# Altium integrated library Altium_Power_Supply_IC.IntLib: 96 symbols (part 2 of 2)
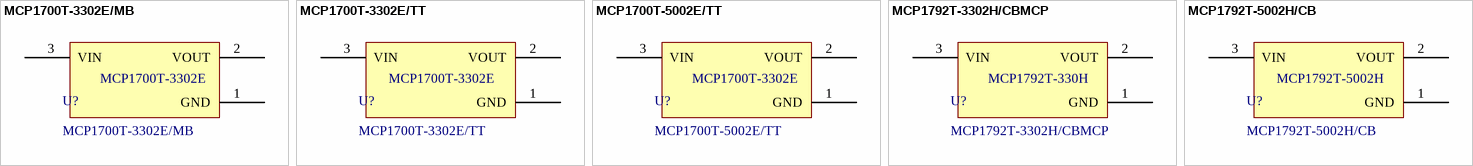
[diagram p12: symbols MCP1700T-3302E/MB to MCP1792T-5002H/CB]

## MCP1700T-3302E/TT
designator U?
Linear Voltage Regulator IC Positive Fixed 1 Output 250mA SOT-23-3; Manufacturer: Microchip Technology; Voltage Input: 6V; Voltage Output: 3.3VV; Supply 1 Name: Mouser; Supply 1 SN: 579-MCP1700T3302E/TT; Supply 2 Name: DigiKey; Supply 2 SN: MCP1700T3302ETTTR-ND; Supply 3 Name: ThegioiIC; Manufacturer Part Number: MCP1700T-3302E/TT; Mounting Technology: SMD; Current Input: *; Current Output: 250mA; Datasheet: https://www.mouser.com/datasheet/2/268/MCP1700_Data_Sheet_20001826F-737536.pdf; Supply 1 URL: https://www.mouser.com/ProductDetail/Microchip-Technology/MCP1700T-3302E-TT?qs=fM4xO01eazPmCNDrdHEdaw%3D%3D; Supply 2 URL: https://www.digikey.com/en/products/detail/microchip-technology/MCP1700T-3302E-TT/652676; Supply 3 SN: *; Supply 3 URL: https://www.thegioiic.com/mcp1700t-3302e-ic-on-ap-3-3v-250ma
footprint MCP1700T-3302E/TT (SOT23, 3-Leads, Body 2.86x2.37mm, Pitch 0.95mm)
pins: 1 GND (power), 2 VOUT (power), 3 VIN (power)
text: MCP1700T-3302E

## MCP1700T-5002E/TT
designator U?
IC REG LINEAR 5V 250MA SOT23-3; Manufacturer: Microchip Technology; Voltage Input: 6; Supply 1 Name: Mouser; Supply 1 SN: 579-MCP1700T5002E/TT; Supply 2 Name: DigiKey; Supply 2 SN: MCP1700T5002ETTTR-ND; Supply 3 Name: ThegioiIC; Manufacturer Part Number: MCP1700T-5002E/TT; Mounting Technology: SMD; Current Input: *; Voltage Output: 5V; Current Output: 250mA; Datasheet: https://www.mouser.com/datasheet/2/268/MCP1700_Data_Sheet_20001826F-737536.pdf; Supply 1 URL: https://www.mouser.com/ProductDetail/Microchip-Technology/MCP1700T-5002E-TT?qs=fM4xO01eazNr4AnStMRB%2Fg%3D%3D; Supply 2 URL: https://www.digikey.com/en/products/detail/microchip-technology/MCP1700T-5002E-TT/652681; Supply 3 SN: *; Supply 3 URL: https://www.thegioiic.com/mcp1700t-5002e-mb-ic-on-ap-5v-250ma
footprint MCP1700T-5002E/TT (SOT23, 3-Leads, Body 2.86x2.37mm, Pitch 0.95mm)
pins: 1 GND (power), 2 VOUT (power), 3 VIN (power)
text: MCP1700T-3302E

## MCP1792T-3302H/CBMCP
designator U?
LDO Voltage Regulators High input voltage regulator 3.3V 3Ld SOT-23A TR.; Manufacturer: Microchip Technology; Voltage Input: 4.5V - 55V; Current Output: 100mA; Supply 1 Name: Mouser; Supply 1 SN: 579-MCP1792T-3302HCB; Supply 2 Name: DigiKey; Supply 2 SN: MCP1792T-3302H/CBTR-ND; Manufacturer Part Number: MCP1792T-3302H/CB; Mounting Technology: SMD; Current Input: *; Voltage Output: 3.3V; Datasheet: https://www.mouser.com/datasheet/2/268/MCP1792_Family_Data_Sheet_DS20006229D-2891803.pdf; Supply 1 URL: https://www.mouser.com/ProductDetail/Microchip-Technology/MCP1792T-3302H-CB?qs=mAH9sUMRCtsJR7ybQ6HmQA%3D%3D; Supply 2 URL: https://www.digikey.com/en/products/detail/microchip-technology/MCP1792T-3302H-CB/10297921; Supply 3 Name: *; Supply 3 SN: *; Supply 3 URL: *
footprint MCP1792T-3302H/CB (SOT23, 3-Leads, Body 2.90x2.55mm, Pitch 0.95mm)
pins: 1 GND (power), 2 VOUT (power), 3 VIN (power)
text: MCP1792T-330H

## MCP1792T-5002H/CB
designator U?
LDO Voltage Regulators High input voltage regulator 5.0 V 3Ld SOT-23A TR; Manufacturer: Microchip Technology; Voltage Input: 4.5V - 55V; Voltage Output: 5V; Current Output: 100mA; Supply 1 Name: Mouser; Supply 1 SN: 579-MCP1792T-5002HCB; Supply 2 Name: DigiKey; Supply 2 SN: MCP1792T-5002H/CBTR-ND; Manufacturer Part Number: MCP1792T-5002H/CB; Mounting Technology: SMD; Current Input: *; Datasheet: https://www.mouser.com/datasheet/2/268/MCP1792_Family_Data_Sheet_DS20006229D-2891803.pdf; Supply 1 URL: https://www.mouser.com/ProductDetail/Microchip-Technology/MCP1792T-5002H-CB?qs=mAH9sUMRCtuAXaaRege0yg%3D%3D; Supply 2 URL: https://www.digikey.com/en/products/detail/microchip-technology/MCP1792T-5002H-CB/10297923; Supply 3 Name: *; Supply 3 SN: *; Supply 3 URL: *
footprint MCP1792T-5002HCB (SOT23, 3-Leads, Body 2.90x2.55mm, Pitch 0.95mm)
pins: 1 GND (power), 2 VOUT (power), 3 VIN (power)
text: MCP1792T-5002H


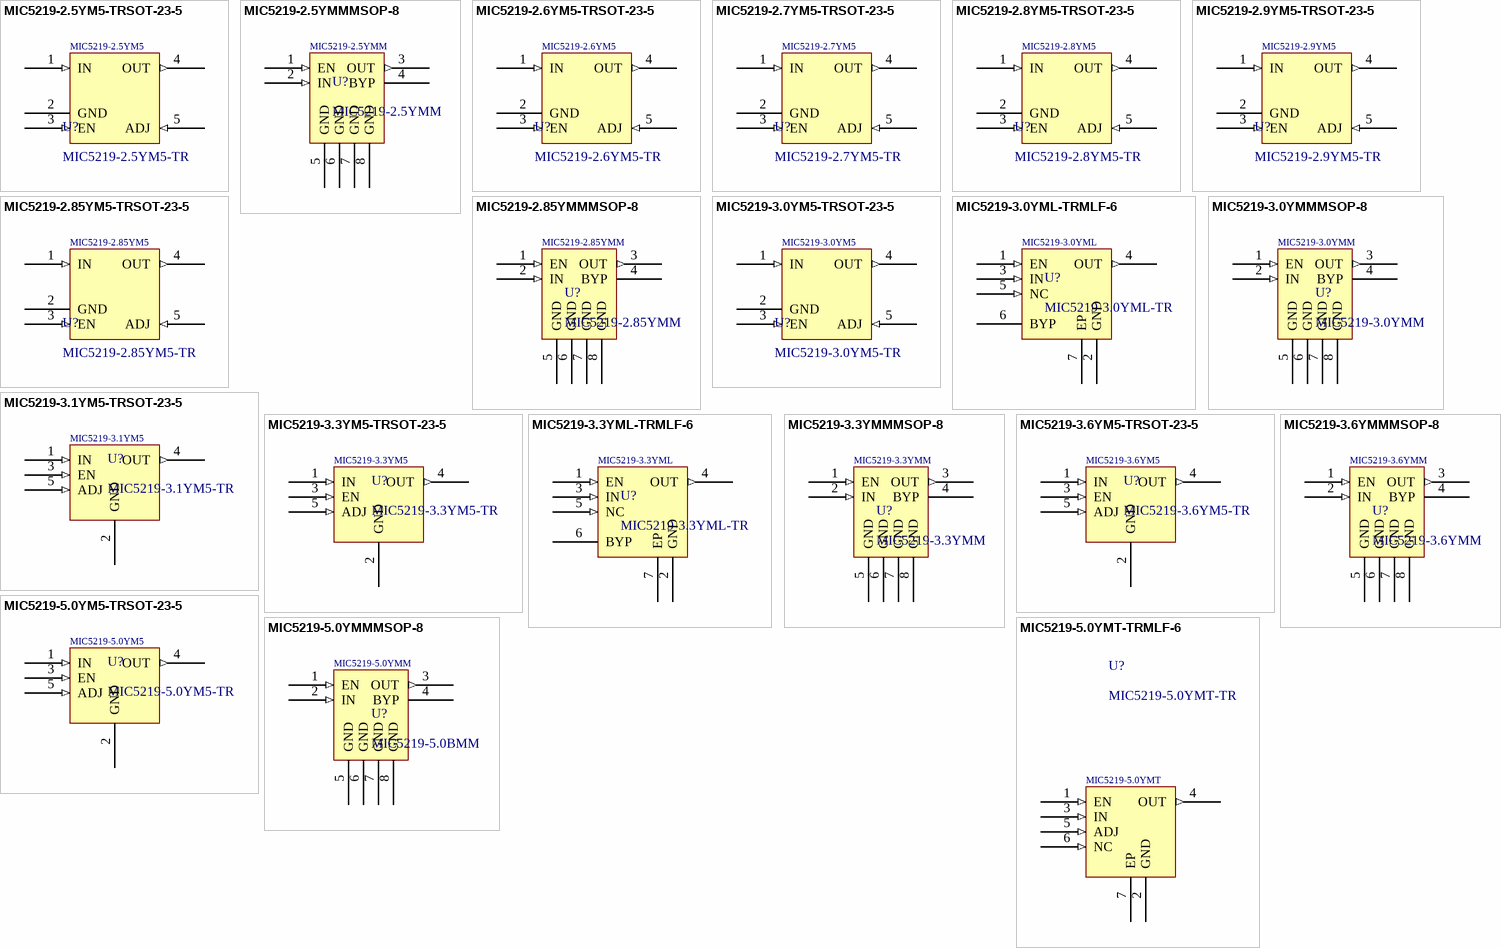
[diagram p7: symbols MIC5219-2.5YM5-TRSOT-23-5 to MIC5219-5.0YMT-TRMLF-6]

## MIC5219-2.5YM5-TRSOT-23-5
designator U?, comment MIC5219-2.5YM5-TR
MIC5219-x family LDO Voltage Regulators, 2.5V output; Manufacturer: Microchip; Number of Outputs: 1; Input Voltage: 2.5 -12 V; Output Current: 500 mA; PSRR: 75 dB; Dropout Voltage: 350-600 mV; Supply 1 Name: Mouser; Supply 1 SN: 998-MIC5219-2.5YM5TR; Supply 2 Name: Digikey; Supply 2 SN: 576-2758-2-ND; Manufacturer SN: MIC5219-2.5YM5-TR; Mounting Style: SMD/SMT; Package / Case: SOT-23-5; Output Voltage: 2.5 V; ComponentLink1Description: Datasheet; ComponentLink1URL: https://ww1.microchip.com/downloads/en/DeviceDoc/MIC5219-500mA-Peak-Output-LDO-Regulator-DS20006021A.pdf; ComponentLink2Description: Supply 1 URL; ComponentLink2URL: https://www.mouser.vn/ProductDetail/Microchip-Technology/MIC5219-2.5YM5-TR?qs=U6T8BxXiZAXURjP%2FxpAn8w%3D%3D; ComponentLink3Description: Supply 2 URL; ComponentLink3URL: https://www.digikey.com/en/products/detail/microchip-technology/MIC5219-2-5YM5-TR/1030543?s=N4IgTCBcDaILIEkDCBWMBGAnAWjAOhQE04VsAVAJRAF0BfIA
footprint MIC5219-x.xYM5 (MIC5219-x.xYM5, SOT-23-5)
pins: 1 IN (in), 2 GND (power), 3 EN (in), 4 OUT (out), 5 ADJ (in)
text: MIC5219-2.5YM5

## MIC5219-2.5YMMMSOP-8
designator U?, comment MIC5219-2.5YMM
MIC5219-x family LDO Voltage Regulators, 2.5V output; Manufacturer: Microchip; Number of Outputs: 1; Input Voltage: 2.5 -12 V; Output Current: 500 mA; PSRR: 75 dB; Dropout Voltage: 350-600 mV; Supply 1 Name: Mouser; Supply 1 SN: 998-MIC5219-2.5YMM; Supply 2 Name: Digikey; Supply 2 SN: 576-2376-ND; Manufacturer SN: MIC5219-2.5YMM; Mounting Style: SMD/SMT; Package / Case: MSOP-8; Output Voltage: 2.5 V; ComponentLink1Description: Datasheet; ComponentLink1URL: https://ww1.microchip.com/downloads/en/DeviceDoc/MIC5219-500mA-Peak-Output-LDO-Regulator-DS20006021A.pdf; ComponentLink2Description: Supply 1 URL; ComponentLink2URL: https://www.mouser.vn/ProductDetail/Microchip-Technology/MIC5219-2.5YMM?qs=kh6iOki%2FeLGSwVLHtzUtsQ%3D%3D; ComponentLink3Description: Supply 2 URL; ComponentLink3URL: https://www.digikey.com/en/products/detail/microchip-technology/MIC5219-2-5YMM/1030544
footprint MIC5219-x.xYMM (MIC5219-x.xYMM, SOT-23-5)
pins: 1 EN (in), 2 IN (in), 3 OUT (out), 4 BYP, 5 GND (power), 6 GND (power), 7 GND (power), 8 GND (power)

## MIC5219-2.6YM5-TRSOT-23-5
designator U?, comment MIC5219-2.6YM5-TR
MIC5219-x family LDO Voltage Regulators, 2.6V output; Manufacturer: Microchip; Number of Outputs: 1; Input Voltage: 2.5 -12 V; Output Current: 500 mA; PSRR: 75 dB; Dropout Voltage: 350-600 mV; Supply 1 Name: Mouser; Supply 1 SN: 998-MIC5219-2.6YM5TR; Supply 2 Name: Digikey; Supply 2 SN: 576-2759-2-ND; Manufacturer SN: MIC5219-2.6YM5-TR; Mounting Style: SMD/SMT; Package / Case: SOT-23-5; Output Voltage: 2.6 V; ComponentLink1Description: Datasheet; ComponentLink1URL: https://ww1.microchip.com/downloads/en/DeviceDoc/MIC5219-500mA-Peak-Output-LDO-Regulator-DS20006021A.pdf; ComponentLink2Description: Supply 1 URL; ComponentLink2URL: https://www.mouser.vn/ProductDetail/Microchip-Technology/MIC5219-2.6YM5-TR?qs=U6T8BxXiZAU94MGLjAqlLA%3D%3D; ComponentLink3Description: Supply 2 URL; ComponentLink3URL: https://www.digikey.com/en/products/detail/microchip-technology/MIC5219-2-6YM5-TR/1030548?s=N4IgTCBcDaILIEkDCBWMBGAnAWjAOgDYBNOFbAFQCUQBdAXyA
footprint MIC5219-x.xYM5 (MIC5219-x.xYM5, SOT-23-5)
pins: 1 IN (in), 2 GND (power), 3 EN (in), 4 OUT (out), 5 ADJ (in)
text: MIC5219-2.6YM5

## MIC5219-2.7YM5-TRSOT-23-5
designator U?, comment MIC5219-2.7YM5-TR
MIC5219-x family LDO Voltage Regulators, 2.7V output; Manufacturer: Microchip; Number of Outputs: 1; Input Voltage: 2.5 -12 V; Output Current: 500 mA; PSRR: 75 dB; Dropout Voltage: 350-600 mV; Supply 1 Name: Mouser; Supply 1 SN: 998-MIC5219-2.7YM5TR; Supply 2 Name: Digikey; Supply 2 SN: 576-2760-2-ND; Manufacturer SN: MIC5219-2.7YM5-TR; Mounting Style: SMD/SMT; Package / Case: SOT-23-5; Output Voltage: 2.7 V; ComponentLink1Description: Datasheet; ComponentLink1URL: https://ww1.microchip.com/downloads/en/DeviceDoc/MIC5219-500mA-Peak-Output-LDO-Regulator-DS20006021A.pdf; ComponentLink2Description: Supply 1 URL; ComponentLink2URL: https://www.mouser.vn/ProductDetail/Microchip-Technology/MIC5219-2.7YM5-TR?qs=U6T8BxXiZAX%2Fh5H9qQkMlQ%3D%3D; ComponentLink3Description: Supply 2 URL; ComponentLink3URL: https://www.digikey.com/en/products/detail/microchip-technology/MIC5219-2-7YM5-TR/1030550?s=N4IgTCBcDaILIEkDCBWMBGAnAWjAOgHYBNOFbAFQCUQBdAXyA
footprint MIC5219-x.xYM5 (MIC5219-x.xYM5, SOT-23-5)
pins: 1 IN (in), 2 GND (power), 3 EN (in), 4 OUT (out), 5 ADJ (in)
text: MIC5219-2.7YM5

## MIC5219-2.8YM5-TRSOT-23-5
designator U?, comment MIC5219-2.8YM5-TR
MIC5219-x family LDO Voltage Regulators, 2.8V output; Manufacturer: Microchip; Number of Outputs: 1; Input Voltage: 2.5 -12 V; Output Current: 500 mA; PSRR: 75 dB; Dropout Voltage: 350-600 mV; Supply 1 Name: Mouser; Supply 1 SN: 998-MIC5219-2.8YM5TR; Supply 2 Name: Digikey; Supply 2 SN: 576-2762-2-ND; Manufacturer SN: MIC5219-2.8YM5-TR; Mounting Style: SMD/SMT; Package / Case: SOT-23-5; Output Voltage: 2.8 V; ComponentLink1Description: Datasheet; ComponentLink1URL: https://ww1.microchip.com/downloads/en/DeviceDoc/MIC5219-500mA-Peak-Output-LDO-Regulator-DS20006021A.pdf; ComponentLink2Description: Supply 1 URL; ComponentLink2URL: https://www.mouser.vn/ProductDetail/Microchip-Technology/MIC5219-2.8YM5-TR?qs=U6T8BxXiZAXy80gOmotftg%3D%3D; ComponentLink3Description: Supply 2 URL; ComponentLink3URL: https://www.digikey.com/en/products/detail/microchip-technology/MIC5219-2-8YM5-TR/1030559?s=N4IgTCBcDaILIEkDCBWMBGAnAWjAOgA4BNOFbAFQCUQBdAXyA
footprint MIC5219-x.xYM5 (MIC5219-x.xYM5, SOT-23-5)
pins: 1 IN (in), 2 GND (power), 3 EN (in), 4 OUT (out), 5 ADJ (in)
text: MIC5219-2.8YM5

## MIC5219-2.9YM5-TRSOT-23-5
designator U?, comment MIC5219-2.9YM5-TR
MIC5219-x family LDO Voltage Regulators, 2.9V output; Manufacturer: Microchip; Number of Outputs: 1; Input Voltage: 2.5 -12 V; Output Current: 500 mA; PSRR: 75 dB; Dropout Voltage: 350-600 mV; Supply 1 Name: Mouser; Supply 1 SN: 998-MIC5219-2.9YM5TR; Supply 2 Name: Digikey; Supply 2 SN: 576-2764-2-ND; Manufacturer SN: MIC5219-2.9YM5-TR; Mounting Style: SMD/SMT; Package / Case: SOT-23-5; Output Voltage: 2.9 V; ComponentLink1Description: Datasheet; ComponentLink1URL: https://ww1.microchip.com/downloads/en/DeviceDoc/MIC5219-500mA-Peak-Output-LDO-Regulator-DS20006021A.pdf; ComponentLink2Description: Supply 1 URL; ComponentLink2URL: https://www.mouser.vn/ProductDetail/Microchip-Technology/MIC5219-2.9YM5-TR?qs=U6T8BxXiZAUu28ZTWpa0Sw%3D%3D; ComponentLink3Description: Supply 2 URL; ComponentLink3URL: https://www.digikey.com/en/products/detail/microchip-technology/MIC5219-2-9YM5-TR/1030562?s=N4IgTCBcDaILIEkDCBWMBGAnAWjAOkwE04VsAVAJRAF0BfIA
footprint MIC5219-x.xYM5 (MIC5219-x.xYM5, SOT-23-5)
pins: 1 IN (in), 2 GND (power), 3 EN (in), 4 OUT (out), 5 ADJ (in)
text: MIC5219-2.9YM5

## MIC5219-2.85YM5-TRSOT-23-5
designator U?, comment MIC5219-2.85YM5-TR
MIC5219-x family LDO Voltage Regulators, 2.85V output; Manufacturer: Microchip; Number of Outputs: 1; Input Voltage: 2.5 -12 V; Output Current: 500 mA; PSRR: 75 dB; Dropout Voltage: 350-600 mV; Supply 1 Name: Mouser; Supply 1 SN: 998-MIC52192.85YM5TR; Supply 2 Name: Digikey; Supply 2 SN: 576-2761-2-ND; Manufacturer SN: MIC5219-2.85YM5-TR; Mounting Style: SMD/SMT; Package / Case: SOT-23-5; Output Voltage: 2.85 V; ComponentLink1Description: Datasheet; ComponentLink1URL: https://ww1.microchip.com/downloads/en/DeviceDoc/MIC5219-500mA-Peak-Output-LDO-Regulator-DS20006021A.pdf; ComponentLink2Description: Supply 1 URL; ComponentLink2URL: https://www.digikey.com/en/products/detail/microchip-technology/MIC5219-2-85YM5-TR/5700955; ComponentLink3Description: Supply 2 URL; ComponentLink3URL: https://www.digikey.com/en/products/detail/microchip-technology/MIC5219-2-85YM5-TR/5700955
footprint MIC5219-x.xYM5 (MIC5219-x.xYM5, SOT-23-5)
pins: 1 IN (in), 2 GND (power), 3 EN (in), 4 OUT (out), 5 ADJ (in)
text: MIC5219-2.85YM5

## MIC5219-2.85YMMMSOP-8
designator U?, comment MIC5219-2.85YMM
MIC5219-x family LDO Voltage Regulators, 2.85V output; Manufacturer: Microchip; Number of Outputs: 1; Input Voltage: 2.5 -12 V; Output Voltage: 2.5 V; Output Current: 500 mA; PSRR: 75 dB; Dropout Voltage: 350-600 mV; Supply 1 Name: Mouser; Supply 1 SN: 998-MIC5219-2.85YMM; Supply 2 Name: Digikey; Supply 2 SN: MIC5219-2.85YMM-ND; Manufacturer SN: MIC5219-2.85YMM; Mounting Style: SMD/SMT; Package / Case: MSOP-8; ComponentLink1Description: Datasheet; ComponentLink1URL: https://ww1.microchip.com/downloads/en/DeviceDoc/MIC5219-500mA-Peak-Output-LDO-Regulator-DS20006021A.pdf; ComponentLink2Description: Supply 1 URL; ComponentLink2URL: https://www.mouser.vn/ProductDetail/Microchip-Technology/MIC5219-2.85YMM?qs=kh6iOki%2FeLGFTrYYM9DwNg%3D%3D; ComponentLink3Description: Supply 2 URL; ComponentLink3URL: https://www.digikey.com/en/products/detail/microchip-technology/MIC5219-2-85YMM/1030555
footprint MIC5219-x.xYMM (MIC5219-x.xYMM, SOT-23-5)
pins: 1 EN (in), 2 IN (in), 3 OUT (out), 4 BYP, 5 GND (power), 6 GND (power), 7 GND (power), 8 GND (power)

## MIC5219-3.0YM5-TRSOT-23-5
designator U?, comment MIC5219-3.0YM5-TR
MIC5219-x family LDO Voltage Regulators, 3.0V output; Manufacturer: Microchip; Number of Outputs: 1; Input Voltage: 2.5 -12 V; Output Current: 500 mA; PSRR: 75 dB; Dropout Voltage: 350-600 mV; Supply 1 Name: Mouser; Supply 1 SN: 998-MIC5219-3.0YM5TR; Supply 2 Name: Digikey; Supply 2 SN: 576-2765-2-ND; Manufacturer SN: MIC5219-3.0YM5-TR; Mounting Style: SMD/SMT; Package / Case: SOT-23-5; Output Voltage: 3.0 V; ComponentLink1Description: Datasheet; ComponentLink1URL: https://ww1.microchip.com/downloads/en/DeviceDoc/MIC5219-500mA-Peak-Output-LDO-Regulator-DS20006021A.pdf; ComponentLink2Description: Supply 1 URL; ComponentLink2URL: https://www.mouser.vn/ProductDetail/Microchip-Technology/MIC5219-3.0YM5-TR?qs=U6T8BxXiZAWAOOoEZYaLhA%3D%3D; ComponentLink3Description: Supply 2 URL; ComponentLink3URL: https://www.digikey.com/en/products/detail/microchip-technology/MIC5219-3-0YM5-TR/1030566?s=N4IgTCBcDaILIEkDCBWMBGAnAWgMwDoAGATThWwBUAlEAXQF8g
footprint MIC5219-x.xYM5 (MIC5219-x.xYM5, SOT-23-5)
pins: 1 IN (in), 2 GND (power), 3 EN (in), 4 OUT (out), 5 ADJ (in)
text: MIC5219-3.0YM5

## MIC5219-3.0YML-TRMLF-6
designator U?, comment MIC5219-3.0YML-TR
MIC5219-x family LDO Voltage Regulators, 3.0V output; Manufacturer: Microchip; Number of Outputs: 1; Input Voltage: 2.5 -12 V; Output Voltage: 3 V; Output Current: 500 mA; PSRR: 75 dB; Dropout Voltage: 350-600 mV; Supply 1 Name: Mouser; Supply 1 SN: 998-MIC5219-3.0YMLTR; Supply 2 Name: Digikey; Supply 2 SN: 576-2766-2-ND; Manufacturer SN: MIC5219-3.0YML-TR; Mounting Style: SMD/SMT; Package / Case: MLF-6; ComponentLink1Description: Datasheet; ComponentLink1URL: https://ww1.microchip.com/downloads/en/DeviceDoc/MIC5219-500mA-Peak-Output-LDO-Regulator-DS20006021A.pdf; ComponentLink2Description: Supply 1 URL; ComponentLink2URL: https://www.mouser.vn/ProductDetail/Microchip-Technology/MIC5219-3.0YML-TR?qs=U6T8BxXiZAWwN17UQBAcEg%3D%3D; ComponentLink3Description: Supply 2 URL; ComponentLink3URL: https://www.digikey.com/en/products/detail/microchip-technology/MIC5219-3-0YML-TR/1030567?s=N4IgTCBcDaILIEkDCBWMBGAnAWgMwDoAGATTgBlsAVAJRAF0BfIA
footprint MIC5219-x.xYML/MT (MIC5219-x.xYML/MT, 6-Pin MLF)
pins: 1 EN (in), 2 GND (power), 3 IN (in), 4 OUT (out), 5 NC (in), 6 BYP, 7 EP (power)
text: MIC5219-3.0YML

## MIC5219-3.0YMMMSOP-8
designator U?, comment MIC5219-3.0YMM
MIC5219-x family LDO Voltage Regulators, 3.0V output; Manufacturer: Microchip; Number of Outputs: 1; Input Voltage: 2.5 -12 V; Output Voltage: 5 V; Output Current: 500 mA; PSRR: 75 dB; Dropout Voltage: 350-600 mV; Supply 1 Name: Mouser; Supply 1 SN: 998-MIC5219-3.0YMM; Supply 2 Name: Digikey; Supply 2 SN: MIC5219-3.0YMM-ND; Manufacturer SN: MIC5219-3.0YMM; Mounting Style: SMD/SMT; Package / Case: MSOP-8; ComponentLink1Description: Datasheet; ComponentLink1URL: https://ww1.microchip.com/downloads/en/DeviceDoc/MIC5219-500mA-Peak-Output-LDO-Regulator-DS20006021A.pdf; ComponentLink2Description: Supply 1 URL; ComponentLink2URL: https://www.mouser.vn/ProductDetail/Microchip-Technology/MIC5219-3.0YMM?qs=kh6iOki%2FeLGPfoR%2FMRsl%252BQ%3D%3D; ComponentLink3Description: Supply 2 URL; ComponentLink3URL: https://www.digikey.com/en/products/detail/microchip-technology/MIC5219-3-0YMM/1030568
footprint MIC5219-x.xYMM (MIC5219-x.xYMM, SOT-23-5)
pins: 1 EN (in), 2 IN (in), 3 OUT (out), 4 BYP, 5 GND (power), 6 GND (power), 7 GND (power), 8 GND (power)

## MIC5219-3.1YM5-TRSOT-23-5
designator U?, comment MIC5219-3.1YM5-TR
MIC5219-x family LDO Voltage Regulators, 3.1V output; Manufacturer: Microchip; Number of Outputs: 1; Input Voltage: 2.5 -12 V; Output Current: 500 mA; PSRR: 75 dB; Dropout Voltage: 350-600 mV; Supply 1 Name: Mouser; Supply 1 SN: 998-MIC5219-3.1YM5TR; Supply 2 Name: Digikey; Supply 2 SN: 576-2767-2-ND; Manufacturer SN: MIC5219-3.1YM5-TR; Mounting Style: SMD/SMT; Package / Case: SOT-23-5; Output Voltage: 3.1 V; ComponentLink1Description: Datasheet; ComponentLink1URL: https://ww1.microchip.com/downloads/en/DeviceDoc/MIC5219-500mA-Peak-Output-LDO-Regulator-DS20006021A.pdf; ComponentLink2Description: Supply 1 URL; ComponentLink2URL: https://www.mouser.vn/ProductDetail/Microchip-Technology/MIC5219-3.1YM5-TR?qs=U6T8BxXiZAXAsa136zQ9lw%3D%3D; ComponentLink3Description: Supply 2 URL; ComponentLink3URL: https://www.digikey.com/en/products/detail/microchip-technology/MIC5219-3-1YM5-TR/1030570?s=N4IgTCBcDaILIEkDCBWMBGAnAWgMwDp0BNOFbAFQCUQBdAXyA
footprint MIC5219-x.xYM5 (MIC5219-x.xYM5, SOT-23-5)
pins: 1 IN (in), 2 GND (power), 3 EN (in), 4 OUT (out), 5 ADJ (in)
text: MIC5219-3.1YM5

## MIC5219-3.3YM5-TRSOT-23-5
designator U?, comment MIC5219-3.3YM5-TR
MIC5219-x family LDO Voltage Regulators, 3.3V output; Manufacturer: Microchip; Number of Outputs: 1; Input Voltage: 2.5 -12 V; Output Current: 500 mA; PSRR: 75 dB; Dropout Voltage: 350-600 mV; Supply 1 Name: Mouser; Supply 1 SN: 998-MIC5219-3.3YM5TR; Supply 2 Name: Digikey; Supply 2 SN: 576-1281-2-ND; Manufacturer SN: MIC5219-3.3YM5-TR; Mounting Style: SMD/SMT; Package / Case: SOT-23-5; Output Voltage: 3.3 V; ComponentLink1Description: Datasheet; ComponentLink1URL: https://ww1.microchip.com/downloads/en/DeviceDoc/MIC5219-500mA-Peak-Output-LDO-Regulator-DS20006021A.pdf; ComponentLink2Description: Supply 1 URL; ComponentLink2URL: https://www.mouser.vn/ProductDetail/Microchip-Technology/MIC5219-3.3YM5-TR?qs=U6T8BxXiZAWojkIJMtSJlw%3D%3D; ComponentLink3Description: Supply 2 URL; ComponentLink3URL: https://www.digikey.com/en/products/detail/microchip-technology/MIC5219-3-3YM5-TR/771750?s=N4IgTCBcDaILIEkDCBWMBGAnAWgMwDpcBNOFbAFQCUQBdAXyA
footprint MIC5219-x.xYM5 (MIC5219-x.xYM5, SOT-23-5)
pins: 1 IN (in), 2 GND (power), 3 EN (in), 4 OUT (out), 5 ADJ (in)
text: MIC5219-3.3YM5

## MIC5219-3.3YML-TRMLF-6
designator U?, comment MIC5219-3.3YML-TR
MIC5219-x family LDO Voltage Regulators, 3.3V output; Manufacturer: Microchip; Number of Outputs: 1; Input Voltage: 2.5 -12 V; Output Voltage: 3 V; Output Current: 500 mA; PSRR: 75 dB; Dropout Voltage: 350-600 mV; Supply 1 Name: Mouser; Supply 1 SN: 998-MIC5219-3.3YMLTR; Supply 2 Name: Digikey; Supply 2 SN: 576-2768-2-NDQ; Manufacturer SN: MIC5219-3.3YML-TR; Mounting Style: SMD/SMT; Package / Case: MLF-6; ComponentLink1Description: Datasheet; ComponentLink1URL: https://ww1.microchip.com/downloads/en/DeviceDoc/MIC5219-500mA-Peak-Output-LDO-Regulator-DS20006021A.pdf; ComponentLink2Description: Supply 1 URL; ComponentLink2URL: https://www.mouser.vn/ProductDetail/Microchip-Technology/MIC5219-3.3YML-TR?qs=U6T8BxXiZAUE302TO%252BbaEg%3D%3D; ComponentLink3Description: Supply 2 URL; ComponentLink3URL: https://www.digikey.com/en/products/detail/microchip-technology/MIC5219-3-3YML-TR/1030574?s=N4IgTCBcDaILIEkDCBWMBGAnAWgMwDpcBNOAGWwBUAlEAXQF8g
footprint MIC5219-x.xYML/MT (MIC5219-x.xYML/MT, 6-Pin MLF)
pins: 1 EN (in), 2 GND (power), 3 IN (in), 4 OUT (out), 5 NC (in), 6 BYP, 7 EP (power)
text: MIC5219-3.3YML

## MIC5219-3.3YMMMSOP-8
designator U?, comment MIC5219-3.3YMM
MIC5219-x family LDO Voltage Regulators, 3.3V output; Manufacturer: Microchip; Number of Outputs: 1; Input Voltage: 2.5 -12 V; Output Current: 500 mA; PSRR: 75 dB; Dropout Voltage: 350-600 mV; Supply 1 Name: Mouser; Supply 1 SN: 998-MIC5219-3.3YMM; Supply 2 Name: Digikey; Supply 2 SN: 576-1827-5-ND; Manufacturer SN: MIC5219-3.3YMM; Mounting Style: SMD/SMT; Package / Case: MSOP-8; Output Voltage: 3.3 V; ComponentLink1Description: Datasheet; ComponentLink1URL: https://ww1.microchip.com/downloads/en/DeviceDoc/MIC5219-500mA-Peak-Output-LDO-Regulator-DS20006021A.pdf; ComponentLink2Description: Supply 1 URL; ComponentLink2URL: https://www.mouser.vn/ProductDetail/Microchip-Technology/MIC5219-3.3YMM?qs=kh6iOki%2FeLEAgynv4GcWkQ%3D%3D; ComponentLink3Description: Supply 2 URL; ComponentLink3URL: https://www.digikey.com/en/products/detail/microchip-technology/MIC5219-3-3YMM/1030575
footprint MIC5219-x.xYMM (MIC5219-x.xYMM, SOT-23-5)
pins: 1 EN (in), 2 IN (in), 3 OUT (out), 4 BYP, 5 GND (power), 6 GND (power), 7 GND (power), 8 GND (power)

## MIC5219-3.6YM5-TRSOT-23-5
designator U?, comment MIC5219-3.6YM5-TR
MIC5219-x family LDO Voltage Regulators, 3.6V output; Manufacturer: Microchip; Number of Outputs: 1; Input Voltage: 2.5 -12 V; Output Current: 500 mA; PSRR: 75 dB; Dropout Voltage: 350-600 mV; Supply 1 Name: Mouser; Supply 1 SN: 998-MIC5219-3.6YM5TR; Supply 2 Name: Digikey; Supply 2 SN: 576-2769-2-ND; Manufacturer SN: MIC5219-3.6YM5-TR; Mounting Style: SMD/SMT; Package / Case: SOT-23-5; Output Voltage: 3.6 V; ComponentLink1Description: Datasheet; ComponentLink1URL: https://ww1.microchip.com/downloads/en/DeviceDoc/MIC5219-500mA-Peak-Output-LDO-Regulator-DS20006021A.pdf; ComponentLink2Description: Supply 1 URL; ComponentLink2URL: https://www.mouser.vn/ProductDetail/Microchip-Technology/MIC5219-3.6YM5-TR?qs=U6T8BxXiZAWOHIj15bI33A%3D%3D; ComponentLink3Description: Supply 2 URL; ComponentLink3URL: https://www.digikey.com/en/products/detail/microchip-technology/MIC5219-3-6YM5-TR/1030580?s=N4IgTCBcDaILIEkDCBWMBGAnAWgMwDoA2ATThWwBUAlEAXQF8g
footprint MIC5219-x.xYM5 (MIC5219-x.xYM5, SOT-23-5)
pins: 1 IN (in), 2 GND (power), 3 EN (in), 4 OUT (out), 5 ADJ (in)
text: MIC5219-3.6YM5

## MIC5219-3.6YMMMSOP-8
designator U?, comment MIC5219-3.6YMM
MIC5219-x family LDO Voltage Regulators, 3.6V output; Manufacturer: Microchip; Number of Outputs: 1; Input Voltage: 2.5 -12 V; Output Voltage: 3.3 V; Output Current: 500 mA; PSRR: 75 dB; Dropout Voltage: 350-600 mV; Supply 1 Name: Mouser; Supply 1 SN: 998-MIC5219-3.6YMM; Supply 2 Name: Digikey; Supply 2 SN: MIC5219-3.6YMM-ND; Manufacturer SN: MIC5219-3.6YMM; Mounting Style: SMD/SMT; Package / Case: MSOP-8; ComponentLink1Description: Datasheet; ComponentLink1URL: https://ww1.microchip.com/downloads/en/DeviceDoc/MIC5219-500mA-Peak-Output-LDO-Regulator-DS20006021A.pdf; ComponentLink2Description: Supply 1 URL; ComponentLink2URL: https://www.mouser.vn/ProductDetail/Microchip-Technology/MIC5219-3.6YMM?qs=kh6iOki%2FeLHQy6u%252Bz%2FlMaQ%3D%3D; ComponentLink3Description: Supply 2 URL; ComponentLink3URL: https://www.digikey.com/en/products/detail/microchip-technology/MIC5219-3-6YMM/1030581
footprint MIC5219-x.xYMM (MIC5219-x.xYMM, SOT-23-5)
pins: 1 EN (in), 2 IN (in), 3 OUT (out), 4 BYP, 5 GND (power), 6 GND (power), 7 GND (power), 8 GND (power)

## MIC5219-5.0YM5-TRSOT-23-5
designator U?, comment MIC5219-5.0YM5-TR
MIC5219-x family LDO Voltage Regulators, 5.0V output; Manufacturer: Microchip; Number of Outputs: 1; Input Voltage: 2.5 -12 V; Output Current: 500 mA; PSRR: 75 dB; Dropout Voltage: 350-600 mV; Supply 1 Name: Mouser; Supply 1 SN: 998-MIC5219-5.0YM5TR; Supply 2 Name: Digikey; Supply 2 SN: 576-2770-2-ND; Manufacturer SN: MIC5219-5.0YM5-TR; Mounting Style: SMD/SMT; Package / Case: SOT-23-5; Output Voltage: 5.0 V; ComponentLink1Description: Datasheet; ComponentLink1URL: https://ww1.microchip.com/downloads/en/DeviceDoc/MIC5219-500mA-Peak-Output-LDO-Regulator-DS20006021A.pdf; ComponentLink2Description: Supply 1 URL; ComponentLink2URL: https://www.mouser.vn/ProductDetail/Microchip-Technology/MIC5219-5.0YM5-TR?qs=U6T8BxXiZAXThrqii9sAvA%3D%3D; ComponentLink3Description: Supply 2 URL; ComponentLink3URL: https://www.digikey.com/en/products/detail/microchip-technology/MIC5219-5-0YM5-TR/1030586?s=N4IgTCBcDaILIEkDCBWMBGAnAWhQOgAYBNOFbAFQCUQBdAXyA
footprint MIC5219-x.xYM5 (MIC5219-x.xYM5, SOT-23-5)
pins: 1 IN (in), 2 GND (power), 3 EN (in), 4 OUT (out), 5 ADJ (in)
text: MIC5219-5.0YM5

## MIC5219-5.0YMMMSOP-8
designator U?, comment MIC5219-5.0BMM
MIC5219-x family LDO Voltage Regulators, 5.0V output; Manufacturer: Microchip; Manufacturer SN: MIC5219-5.0YMM; Number of Outputs: 1; Input Voltage: 2.5 -12 V; Output Voltage: 5 V; Output Current: 500 mA; PSRR: 75 dB; Dropout Voltage: 350-600 mV; Supply 1 Name: Mouser; Supply 1 SN: 998-MIC5219-5.0YMM; Supply 2 Name: Digikey; Supply 2 SN: 576-1828-5-ND; Mounting Style: SMD/SMT; Package / Case: MSOP-8; ComponentLink1Description: Datasheet; ComponentLink1URL: https://ww1.microchip.com/downloads/en/DeviceDoc/MIC5219-500mA-Peak-Output-LDO-Regulator-DS20006021A.pdf; ComponentLink2Description: Supply 1 URL; ComponentLink2URL: https://www.mouser.vn/ProductDetail/Microchip-Technology/MIC5219-5.0YMM?qs=kh6iOki%2FeLGcAZQ4JCOeow%3D%3D; ComponentLink3Description: Supply 2 URL; ComponentLink3URL: https://www.digikey.com/en/products/detail/microchip-technology/MIC5219-5-0YMM/1030587
footprint MIC5219-x.xYMM (MIC5219-x.xYMM, SOT-23-5)
pins: 1 EN (in), 2 IN (in), 3 OUT (out), 4 BYP, 5 GND (power), 6 GND (power), 7 GND (power), 8 GND (power)

## MIC5219-5.0YMT-TRMLF-6
designator U?, comment MIC5219-5.0YMT-TR
MIC5219-x family LDO Voltage Regulators, 5.0V output; Manufacturer: Microchip; Number of Outputs: 1; Input Voltage: 2.5 -12 V; Output Voltage: 5 V; Output Current: 500 mA; PSRR: 75 dB; Dropout Voltage: 350-600 mV; Supply 1 Name: Mouser; Supply 1 SN: 998-MIC5219-5.0YMTTR; Supply 2 Name: Digikey; Supply 2 SN: 576-3521-2-ND; Manufacturer SN: MIC5219-5.0YMT-TR; Mounting Style: SMD/SMT; Package / Case: MLF-6; ComponentLink1Description: Datasheet; ComponentLink1URL: https://ww1.microchip.com/downloads/en/DeviceDoc/MIC5219-500mA-Peak-Output-LDO-Regulator-DS20006021A.pdf; ComponentLink2Description: Supply 1 URL; ComponentLink2URL: https://www.mouser.vn/ProductDetail/Microchip-Technology/MIC5219-5.0YMT-TR?qs=U6T8BxXiZAUlqYSj5RtOQw%3D%3D; ComponentLink3Description: Supply 2 URL; ComponentLink3URL: https://www.digikey.com/en/products/detail/microchip-technology/MIC5219-5-0YMT-TR/2095492?s=N4IgTCBcDaILIEkDCBWMBGAnAWhQOgAYBNOAFW1ICUQBdAXyA
footprint MIC5219-x.xYML/MT (MIC5219-x.xYML/MT, 6-Pin MLF)
pins: 1 EN (in), 2 GND (power), 3 IN (in), 4 OUT (out), 5 ADJ (in), 6 NC (in), 7 EP (power)
text: MIC5219-5.0YMT


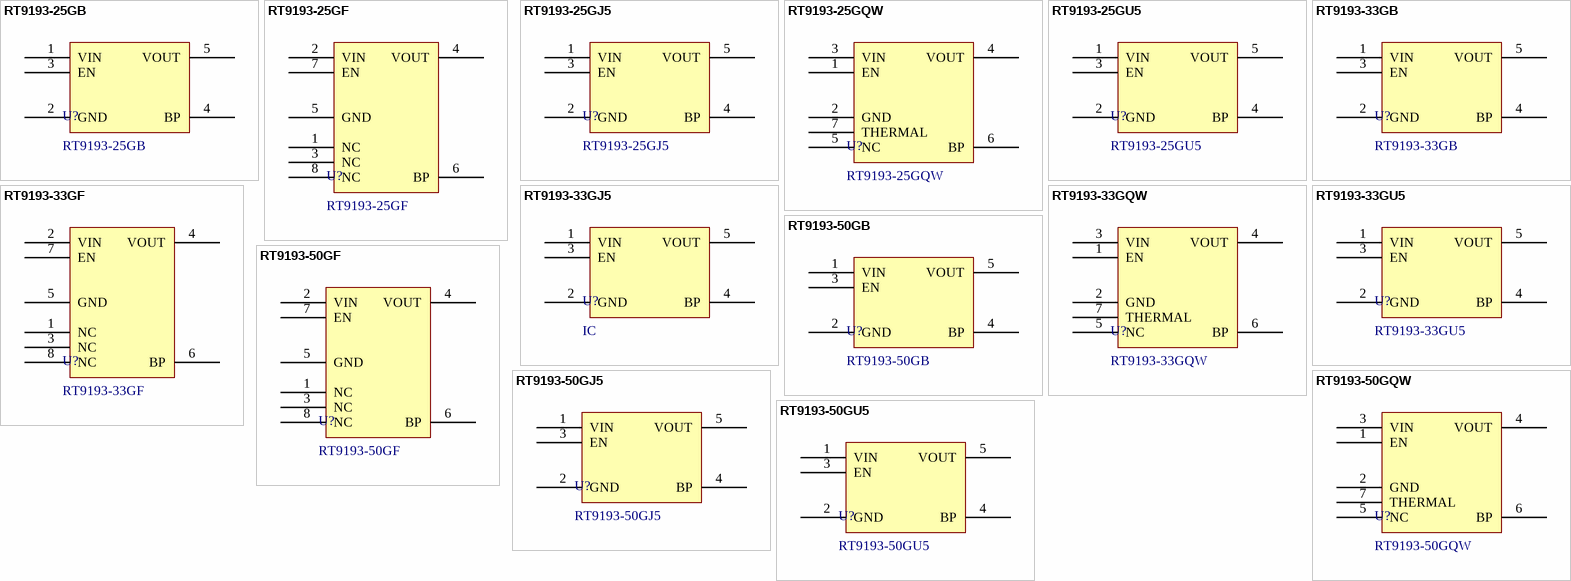
[diagram p8: symbols RT9193-25GB to RT9193-50GU5]

## RT9193-25GB
designator U?
LDO Voltage Regulators 300mA, Ultra-Low Noise, Ultra-Fast CMOS LDO Regulator, SOT-23-5, 2.5 V; Manufacturer: Richtek; Voltage Output: 2.5 V; Rated Current: 90 uA; Voltage Input Max: 5.5 V; PSRR: - 70 dB; Voltage Drop: 220 mV; Supply Name 1: Mouser; Supply SN 1: 835-RT9193-25GB; Supply Name 2: Digi-Key; Supply SN 2: 1028-1015-6-ND; Mounting Technology: SMD/SMT; Packaging: SOT-23-5; Current Output: 300 mA; ComponentLink1Description: Datasheet; ComponentLink1URL: https://www.mouser.vn/datasheet/2/1458/DS9193_18-3104722.pdf; Operating Temperature: - 40 C to  + 85 C; ComponentLink2Description: Local Supply; ComponentLink2URL: https://www.mouser.vn/ProductDetail/Richtek/RT9193-25GB?qs=amGC7iS6iy%252BWegPok0BkoQ%3D%3D; Voltage Input Min: 2.5 V; Supply URL 1: https://www.mouser.vn/ProductDetail/Richtek/RT9193-25GB?qs=amGC7iS6iy%252BWegPok0BkoQ%3D%3D; Supply URL 2: https://www.digikey.com/en/products/detail/richtek-usa-inc/RT9193-25GB/2470049?s=N4IgTCBcDaIEoBUCcBGJBmAtGArAcQCEQBdAXyA
footprint RT9193-xxGB (SOT23, 5-Leads, Body 2.90x2.79mm, Pitch 0.95mm, IPC Medium Density)
pins: 1 VIN (power), 2 GND (power), 3 EN (power), 4 BP (power), 5 VOUT (power)

## RT9193-25GF
designator U?
LDO Voltage Regulators 300mA, Ultra-Low Noise, Ultra-Fast CMOS LDO Regulator, MSOP-8, 2.5V; Manufacturer: Richtek; Voltage Input Max: 5.5 V; PSRR: - 70 dB; Rated Current: 90 uA; Voltage Drop: 220 mV; Supply Name 1: Digi-Key; Supply SN 1: RT9193-25GF-ND; ComponentLink1Description: Datasheet; ComponentLink1URL: https://www.mouser.vn/datasheet/2/1458/DS9193_18-3104722.pdf; Product: LDO Voltage Regulators; Mounting Technology: SMD/SMT; Packaging: MSOP-8; Voltage Output: 2.5V; Current Output: 300 mA; Voltage Input Min: 2.5 V; Operating Temperature: - 40 C to  + 85 C; Supply URL 1: https://www.digikey.com/en/products/detail/richtek-usa-inc/RT9193-25GF/2546923?s=N4IgTCBcDaIEoBUCcBGJBmAtGArAcQDEQBdAXyA
footprint RT9193-xxGF (TSOP, 8-Leads, Body 3.00x3.00mm, Pitch 0.65mm, IPC Medium Density)
pins: 1 NC (power), 2 VIN (power), 3 NC (power), 4 VOUT (power), 5 GND (power), 6 BP (power), 7 EN (power), 8 NC (power)

## RT9193-25GJ5
designator U?
LDO Voltage Regulators 300mA, Ultra-Low Noise, Ultra-Fast CMOS LDO Regulator, TSOT-23-5, 2.5V; Manufacturer: Richtek; Rated Current: 90 uA; Voltage Input Max: 5.5 V; PSRR: - 70 dB; Voltage Drop: 220 mV; Supply Name 1: Digi-Key; Supply SN 1: RT9193-25GJ5-ND; ComponentLink1Description: Datasheet; ComponentLink1URL: https://www.mouser.vn/datasheet/2/1458/DS9193_18-3104722.pdf; Product: LDO Voltage Regulators; Mounting Technology: SMD/SMT; Packaging: TSOT-23-5; Voltage Output: 2.5V; Current Output: 300 mA; Voltage Input Min: 2.5 V; Operating Temperature: - 40 C to  + 85 C; Supply URL 1: https://www.digikey.com/en/products/detail/richtek-usa-inc/RT9193-25GJ5/2546925?s=N4IgTCBcDaIEoBUCcBGJBmAtGArAcQCkcQBdAXyA
footprint RT9193-xxGJ5 (SOT23, 5-Leads, Body 2.90x2.80mm, Pitch 0.95mm, IPC Medium Density)
pins: 1 VIN (power), 2 GND (power), 3 EN (power), 4 BP (power), 5 VOUT (power)

## RT9193-25GQW
designator U?
LDO Voltage Regulators 300mA, Ultra-Low Noise, Ultra-Fast CMOS LDO Regulator, WDFN-6L 2x2 (W-Type), 2.5V; Manufacturer: Richtek; Rated Current: 90 uA; Voltage Input Max: 5.5 V; PSRR: - 70 dB; Voltage Drop: 220 mV; Supply Name 1: Digi-Key; Supply SN 1: RT9193-25GQW-ND; ComponentLink1Description: Datasheet; ComponentLink1URL: https://www.mouser.vn/datasheet/2/1458/DS9193_18-3104722.pdf; Product: LDO Voltage Regulators; Mounting Technology: SMD/SMT; Packaging: WDFN-6L 2x2 (W-Type); Voltage Output: 2.5V; Current Output: 300 mA; Voltage Input Min: 2.5 V; Operating Temperature: - 40 C to  + 85 C; Supply URL 1: https://www.digikey.com/en/products/detail/richtek-usa-inc/RT9193-25GQW/2546927?s=N4IgTCBcDaIEoBUCcBGJBmAtGArAcQEUB1EAXQF8g
footprint RT9193-xxGQW (SON, 6-Leads, Body 2.00x2.00mm, Pitch 0.65mm, Thermal Pad 1.23x0.68mm, IPC Medium Density)
pins: 1 EN (power), 2 GND (power), 3 VIN (power), 4 VOUT (power), 5 NC (power), 6 BP (power), 7 THERMAL (power)

## RT9193-25GU5
designator U?
LDO Voltage Regulators 300mA, Ultra-Low Noise, Ultra-Fast CMOS LDO Regulator, SC-70-5, 2.5V; Manufacturer: Richtek; Rated Current: 90 uA; Voltage Input Max: 5.5 V; PSRR: - 70 dB; Voltage Drop: 220 mV; Supply Name 1: Digi-Key; Supply SN 1: RT9193-25GU5-ND; ComponentLink1Description: Datasheet; ComponentLink1URL: https://www.mouser.vn/datasheet/2/1458/DS9193_18-3104722.pdf; Product: LDO Voltage Regulators; Mounting Technology: SMD/SMT; Packaging: SC-70-5; Voltage Output: 2.5V; Current Output: 300 mA; Voltage Input Min: 2.5 V; Operating Temperature: - 40 C to  + 85 C; Supply URL 1: https://www.digikey.com/en/products/detail/richtek-usa-inc/RT9193-25GU5/2546929?s=N4IgTCBcDaIEoBUCcBGJBmAtGArAcQFUcQBdAXyA
footprint RT9193-xxGU5 (SOT23, 5-Leads, Body 2.03x2.13mm, Pitch 0.65mm, IPC Medium Density)
pins: 1 VIN (power), 2 GND (power), 3 EN (power), 4 BP (power), 5 VOUT (power)

## RT9193-33GB
designator U?
LDO Voltage Regulators 300mA, Ultra-Low Noise, Ultra-Fast CMOS LDO Regulator, SOT-23-5,  3.3 V; Manufacturer: Richtek; Voltage Output: 3.3 V; Rated Current: 90 uA; Voltage Input Min: 2.5 V; PSRR: - 70 dB; Voltage Drop: 220 mV; Supply Name 1: Mouser; Supply SN 1: 835-RT9193-33GB; Supply Name 2: Digi-Key; Supply SN 2: 1028-1014-6-ND; Packaging: SOT-23-5; Current Output: 300 mA; Operating Temperature: - 40 C to  + 85 C; Mounting Technology: SMD/SMT; Product: Bộ ổn áp LDO; ComponentLink1Description: Datasheet; ComponentLink1URL: https://www.mouser.vn/datasheet/2/1458/DS9193_18-3104722.pdf; ComponentLink2Description: Local Supply; ComponentLink2URL: https://www.mouser.vn/ProductDetail/Richtek/RT9193-33GB?qs=amGC7iS6iy8ybRcZ9Wn2ww%3D%3D; Supply URL 1: https://www.mouser.vn/ProductDetail/Richtek/RT9193-33GB?qs=amGC7iS6iy8ybRcZ9Wn2ww%3D%3D; Supply URL 2: https://www.digikey.com/en/products/detail/richtek-usa-inc/RT9193-33GB/2470048?s=N4IgTCBcDaIEoBUCcBGJBmAtO9BxAQiALoC%2BQA
footprint RT9193-xxGB (SOT23, 5-Leads, Body 2.90x2.79mm, Pitch 0.95mm, IPC Medium Density)
pins: 1 VIN (power), 2 GND (power), 3 EN (power), 4 BP (power), 5 VOUT (power)

## RT9193-33GF
designator U?
LDO Voltage Regulators 300mA, Ultra-Low Noise, Ultra-Fast CMOS LDO Regulator, MSOP-8, 3.3V; Manufacturer: Richtek; Rated Current: 90 uA; Voltage Input Min: 2.5 V; Voltage Input Max: 5.5 V; PSRR: - 70 dB; Voltage Drop: 220 mV; Supply Name 1: Digi-Key; Supply SN 1: 1028-RT9193-33GFTR-ND; ComponentLink1Description: Datasheet; ComponentLink1URL: https://www.mouser.vn/datasheet/2/1458/DS9193_18-3104722.pdf; Product: LDO Voltage Regulators; Mounting Technology: SMD/SMT; Packaging: MSOP-8; Voltage Output: 3.3V; Current Output: 300 mA; Operating Temperature: - 40 C to  + 85 C; Supply URL 1: https://www.digikey.com/en/products/detail/richtek-usa-inc/RT9193-33GF/2546969?s=N4IgTCBcDaIEoBUCcBGJBmAtO9BxAYiALoC%2BQA
footprint RT9193-xxGF (TSOP, 8-Leads, Body 3.00x3.00mm, Pitch 0.65mm, IPC Medium Density)
pins: 1 NC (power), 2 VIN (power), 3 NC (power), 4 VOUT (power), 5 GND (power), 6 BP (power), 7 EN (power), 8 NC (power)

## RT9193-33GJ5
designator U?, comment IC
LDO Voltage Regulators 300mA, Ultra-Low Noise, Ultra-Fast CMOS LDO Regulator, TSOT-23-5, 3.3V; Manufacturer: Richtek; Rated Current: 90 uA; Voltage Input Min: 2.5 V; Voltage Input Max: 5.5 V; PSRR: - 70 dB; Voltage Drop: 220 mV; Supply Name 1: Digi-Key; Supply SN 1: RT9193-33GJ5-ND; Product: LDO Voltage Regulators; ComponentLink1Description: Datasheet; ComponentLink1URL: https://www.mouser.vn/datasheet/2/1458/DS9193_18-3104722.pdf; Mounting Technology: SMD/SMT; Packaging: TSOT-23-5; Voltage Output: 3.3V; Current Output: 300 mA; Operating Temperature: - 40 C to  + 85 C; Supply URL 1: https://www.digikey.com/en/products/detail/richtek-usa-inc/RT9193-33GJ5/2546971?s=N4IgTCBcDaIEoBUCcBGJBmAtO9BxAUgKwgC6AvkA
footprint RT9193-xxGJ5 (SOT23, 5-Leads, Body 2.90x2.80mm, Pitch 0.95mm, IPC Medium Density)
pins: 1 VIN (power), 2 GND (power), 3 EN (power), 4 BP (power), 5 VOUT (power)

## RT9193-33GQW
designator U?
LDO Voltage Regulators 300mA, Ultra-Low Noise, Ultra-Fast CMOS LDO Regulator, WDFN-6L 2x2 (W-Type), 3.3V; Manufacturer: Richtek; Rated Current: 90 uA; Voltage Input Min: 2.5 V; Voltage Input Max: 5.5 V; PSRR: - 70 dB; Voltage Drop: 220 mV; Supply Name 1: Digi-Key; Supply SN 1: RT9193-33GQW-ND; ComponentLink1Description: Datasheet; ComponentLink1URL: https://www.mouser.vn/datasheet/2/1458/DS9193_18-3104722.pdf; Product: LDO Voltage Regulators; Mounting Technology: SMD/SMT; Packaging: WDFN-6L 2x2 (W-Type); Voltage Output: 3.3V; Current Output: 300 mA; Operating Temperature: - 40 C to  + 85 C; Supply URL 1: https://www.digikey.com/en/products/detail/richtek-usa-inc/RT9193-33GQW/2546973?s=N4IgTCBcDaIEoBUCcBGJBmAtO9BxAigOogC6AvkA
footprint RT9193-xxGQW (SON, 6-Leads, Body 2.00x2.00mm, Pitch 0.65mm, Thermal Pad 1.23x0.68mm, IPC Medium Density)
pins: 1 EN (power), 2 GND (power), 3 VIN (power), 4 VOUT (power), 5 NC (power), 6 BP (power), 7 THERMAL (power)

## RT9193-33GU5
designator U?
LDO Voltage Regulators 300mA, Ultra-Low Noise, Ultra-Fast CMOS LDO Regulator, SC-70-5, 3.3V; Manufacturer: Richtek; Rated Current: 90 uA; Voltage Input Min: 2.5 V; Voltage Input Max: 5.5 V; PSRR: - 70 dB; Voltage Drop: 220 mV; Supply Name 1: Digi-Key; Supply SN 1: RT9193-33GU5-ND; ComponentLink1Description: Datasheet; ComponentLink1URL: https://www.mouser.vn/datasheet/2/1458/DS9193_18-3104722.pdf; Product: LDO Voltage Regulators; Mounting Technology: SMD/SMT; Packaging: SC-70-5; Voltage Output: 3.3V; Current Output: 300 mA; Operating Temperature: - 40 C to  + 85 C; Supply URL 1: https://www.digikey.com/en/products/detail/richtek-usa-inc/RT9193-33GU5/2546976?s=N4IgTCBcDaIEoBUCcBGJBmAtO9BxAqgKwgC6AvkA
footprint RT9193-xxGU5 (SOT23, 5-Leads, Body 2.03x2.13mm, Pitch 0.65mm, IPC Medium Density)
pins: 1 VIN (power), 2 GND (power), 3 EN (power), 4 BP (power), 5 VOUT (power)

## RT9193-50GB
designator U?
LDO Voltage Regulators 300mA, Ultra-Low Noise, Ultra-Fast CMOS LDO Regulator, SOT-23-5, 5V; Manufacturer: Richtek; Rated Current: 90 uA; Voltage Input Min: 2.5 V; Voltage Input Max: 5.5 V; PSRR: - 70 dB; Voltage Drop: 220 mV; Product: LDO Voltage Regulators; Mounting Technology: SMD/SMT; Packaging: SOT-23-5; Voltage Output: 5V; Operating Temperature: - 40 C to  + 85 C; ComponentLink1Description: Datasheet; ComponentLink1URL: https://www.mouser.vn/datasheet/2/1458/DS9193_18-3104722.pdf
footprint RT9193-xxGB (SOT23, 5-Leads, Body 2.90x2.79mm, Pitch 0.95mm, IPC Medium Density)
pins: 1 VIN (power), 2 GND (power), 3 EN (power), 4 BP (power), 5 VOUT (power)

## RT9193-50GF
designator U?
LDO Voltage Regulators 300mA, Ultra-Low Noise, Ultra-Fast CMOS LDO Regulator, MSOP-8, 5V; Manufacturer: Richtek; Rated Current: 90 uA; Voltage Input Min: 2.5 V; Voltage Input Max: 5.5 V; PSRR: - 70 dB; Voltage Drop: 220 mV; ComponentLink1Description: Datasheet; ComponentLink1URL: https://www.mouser.vn/datasheet/2/1458/DS9193_18-3104722.pdf; Product: LDO Voltage Regulators; Mounting Technology: SMD/SMT; Packaging: MSOP-8; Voltage Output: 5V; Current Output: 300 mA; Operating Temperature: - 40 C to  + 85 C
footprint RT9193-xxGF (TSOP, 8-Leads, Body 3.00x3.00mm, Pitch 0.65mm, IPC Medium Density)
pins: 1 NC (power), 2 VIN (power), 3 NC (power), 4 VOUT (power), 5 GND (power), 6 BP (power), 7 EN (power), 8 NC (power)

## RT9193-50GJ5
designator U?
LDO Voltage Regulators 300mA, Ultra-Low Noise, Ultra-Fast CMOS LDO Regulator, TSOT-23-5, 5V; Manufacturer: Richtek; Rated Current: 90 uA; Voltage Input Min: 2.5 V; Voltage Input Max: 5.5 V; PSRR: - 70 dB; Voltage Drop: 220 mV; ComponentLink1Description: Datasheet; ComponentLink1URL: https://www.mouser.vn/datasheet/2/1458/DS9193_18-3104722.pdf; Product: LDO Voltage Regulators; Mounting Technology: SMD/SMT; Packaging: TSOT-23-5; Voltage Output: 5V; Current Output: 300 mA; Operating Temperature: - 40 C to  + 85 C; Supply Name 1: *; Supply SN 1: *; Supply URL 1: *
footprint RT9193-xxGJ5 (SOT23, 5-Leads, Body 2.90x2.80mm, Pitch 0.95mm, IPC Medium Density)
pins: 1 VIN (power), 2 GND (power), 3 EN (power), 4 BP (power), 5 VOUT (power)

## RT9193-50GQW
designator U?
LDO Voltage Regulators 300mA, Ultra-Low Noise, Ultra-Fast CMOS LDO Regulator, WDFN-6L 2x2 (W-Type), 5V; Manufacturer: Richtek; Rated Current: 90 uA; Voltage Input Min: 2.5 V; Voltage Input Max: 5.5 V; PSRR: - 70 dB; Voltage Drop: 220 mV; ComponentLink1Description: Datasheet; ComponentLink1URL: https://www.mouser.vn/datasheet/2/1458/DS9193_18-3104722.pdf; Product: LDO Voltage Regulators; Mounting Technology: SMD/SMT; Packaging: WDFN-6L 2x2 (W-Type); Voltage Output: 5V; Current Output: 300 mA; Operating Temperature: - 40 C to  + 85 C
footprint RT9193-xxGQW (SON, 6-Leads, Body 2.00x2.00mm, Pitch 0.65mm, Thermal Pad 1.23x0.68mm, IPC Medium Density)
pins: 1 EN (power), 2 GND (power), 3 VIN (power), 4 VOUT (power), 5 NC (power), 6 BP (power), 7 THERMAL (power)

## RT9193-50GU5
designator U?
LDO Voltage Regulators 300mA, Ultra-Low Noise, Ultra-Fast CMOS LDO Regulator, SC-70-5, 5V; Manufacturer: Richtek; Rated Current: 90 uA; Voltage Input Min: 2.5 V; Voltage Input Max: 5.5 V; PSRR: - 70 dB; Voltage Drop: 220 mV; ComponentLink1Description: Datasheet; ComponentLink1URL: https://www.mouser.vn/datasheet/2/1458/DS9193_18-3104722.pdf; Product: LDO Voltage Regulators; Mounting Technology: SMD/SMT; Packaging: SC-70-5; Voltage Output: 5V; Current Output: 300 mA; Operating Temperature: - 40 C to  + 85 C
footprint RT9193-xxGU5 (SOT23, 5-Leads, Body 2.03x2.13mm, Pitch 0.65mm, IPC Medium Density)
pins: 1 VIN (power), 2 GND (power), 3 EN (power), 4 BP (power), 5 VOUT (power)


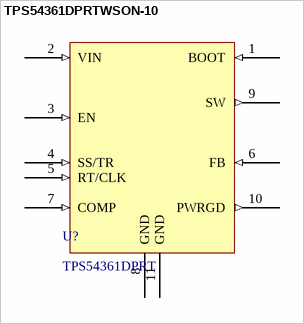
[diagram p9: symbol TPS54361DPRTWSON-10]

## TPS54361DPRTWSON-10
designator U?, comment TPS54361DPRT
Switching Voltage Regulators, 800 mV to 59 V output; Manufacturer: Texas Instruments; Number of Outputs: 1; Input Voltage: 4.5-60 V; Output Voltage: 0.8-59 V; Output Current: 3.5 A; Supply 1 Name: Mouser; Supply 1 SN: 595-TPS54361DPRT; Supply 2 Name: Digikey; Supply 2 SN: 296-37248-2-ND; Manufacturer SN: TPS54361DPRT; Mounting Style: SMD/SMT; Package / Case: WSON-10; ComponentLink1Description: Datasheet link; ComponentLink1URL: https://www.ti.com/general/docs/suppproductinfo.tsp?distId=10&gotoUrl=https%3A%2F%2Fwww.ti.com%2Flit%2Fgpn%2Ftps54361; ComponentLink2Description: Supply 1 URL; ComponentLink2URL: https://www.mouser.vn/ProductDetail/Texas-Instruments/TPS54361DPRT?qs=wrT8kFYR778NnxU7eySXLw%3D%3D; ComponentLink3Description: Supply 2 SN; ComponentLink3URL: https://www.digikey.com/en/products/detail/texas-instruments/TPS54361DPRT/4695367?s=N4IgTCBcDaICoAUDKBWALAZgGwEYAiCASnCALoC%2BQA
footprint TPS54361DPRT
pins: 1 BOOT (in), 2 VIN (in), 3 EN (in), 4 SS/TR  (in), 5 RT/CLK  (in), 6 FB (in), 7 COMP (in), 8 GND (power), 9 SW (out), 10 PWRGD (out), 11 GND (power)


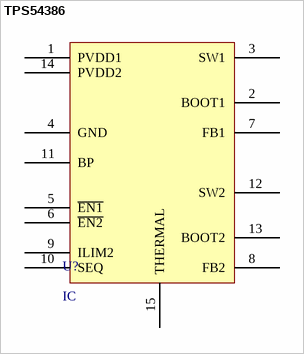
[diagram p10: symbol TPS54386]

## TPS54386
designator U?, comment IC
TPS54386; Vin: 4.5V; Vin max: 28V; Vout: 0.8V; Vout max: 25.2V; Dòng đầu ra: 3A; Tần số chuyển dổi: 600kHz; Phạm vi nhiệt độ: -40 C đến 125 C; ComponentLink1Description: Datasheet; ComponentLink1URL: https://www.ti.com/lit/ds/symlink/tps54386.pdf?ts=1689643056217&ref_url=https%253A%252F%252Fwww.ti.com%252Fgeneral%252Fdocs%252Fsuppproductinfo.tsp%253FdistId%253D10%2526gotoUrl%253Dhttps%253A%252F%252Fwww.ti.com%252Flit%252Fgpn%252Ftps54386
footprint TPS54386 (TSOP, 14-Leads, Body 5.00x4.40mm, Pitch 0.65mm, Thermal Pad 2.31x2.46mm, IPC Medium Density)
pins: 1 PVDD1 (power), 2 BOOT1 (power), 3 SW1 (power), 4 GND (power), 5 ~{EN1} (power), 6 ~{EN2} (power), 7 FB1 (power), 8 FB2 (power), 9 ILIM2 (power), 10 SEQ (power), 11 BP (power), 12 SW2 (power), 13 BOOT2 (power), 14 PVDD2 (power), 15 THERMAL (power)


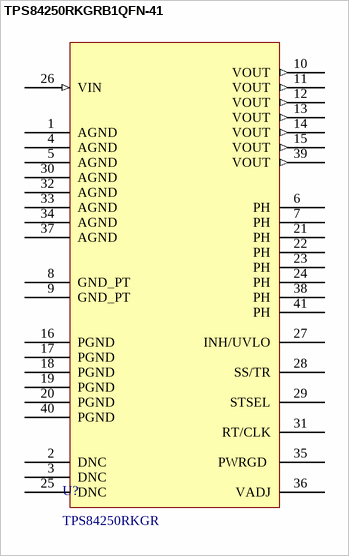
[diagram p11: symbol TPS84250RKGRB1QFN-41]

## TPS84250RKGRB1QFN-41
designator U?, comment TPS84250RKGR
Switching Voltage Regulators, 2.5V to 15V output; Manufacturer: Texas Instruments; Number of Outputs: 1; Input Voltage: 7-50 V; Output Voltage: 2.5-15 V; Output Current: 2.5 A; Supply 1 Name: Mouser; Supply 1 SN: 595-TPS84250RKGR; Supply 2 Name: Digikey; Supply 2 SN: 296-34944-2-ND; Manufacturer SN: TPS84250RKGR; Mounting Style: SMD/SMT; Package / Case: B1QFN-41; ComponentLink1Description: Datasheet link; ComponentLink1URL: http://www.ti.com/lit/ds/symlink/tps84250.pdf; ComponentLink2Description: Supply 1 URL; ComponentLink2URL: https://www.mouser.com/ProductDetail/Texas-Instruments/TPS84250RKGR?qs=4whTb%2F0XQMjhZkugPH%2FKDw%3D%3D; ComponentLink3Description: Supply 2 URL; ComponentLink3URL: https://www.digikey.com/en/products/detail/texas-instruments/TPS84250RKGR/3661876
footprint TPS84250RKGR
pins: 1 AGND, 2 DNC, 3 DNC, 4 AGND, 5 AGND, 6 PH, 7 PH, 8 GND_PT, 9 GND_PT, 10 VOUT (out), 11 VOUT (out), 12 VOUT (out), 13 VOUT (out), 14 VOUT (out), 15 VOUT (out), 16 PGND, 17 PGND, 18 PGND, 19 PGND, 20 PGND, 21 PH, 22 PH, 23 PH, 24 PH, 25 DNC, 26 VIN (in), 27 INH/UVLO, 28 SS/TR, 29 STSEL, 30 AGND, 31 RT/CLK, 32 AGND, 33 AGND, 34 AGND, 35 PWRGD , 36 VADJ, 37 AGND, 38 PH, 39 VOUT (out), 40 PGND, 41 PH